# Altium footprint library sunrise_alarm.PcbLib: 1 footprints
Each footprint in its own frame and in the unit in brackets; x right, y up, seen from the top. Pads: shape width x height; smd on the part's side, far side on the other; paste and mask are expansions set on the pad; w line width, h text height; cw(c..) or ccw(c..) is an arc to the next point about the centre after c.
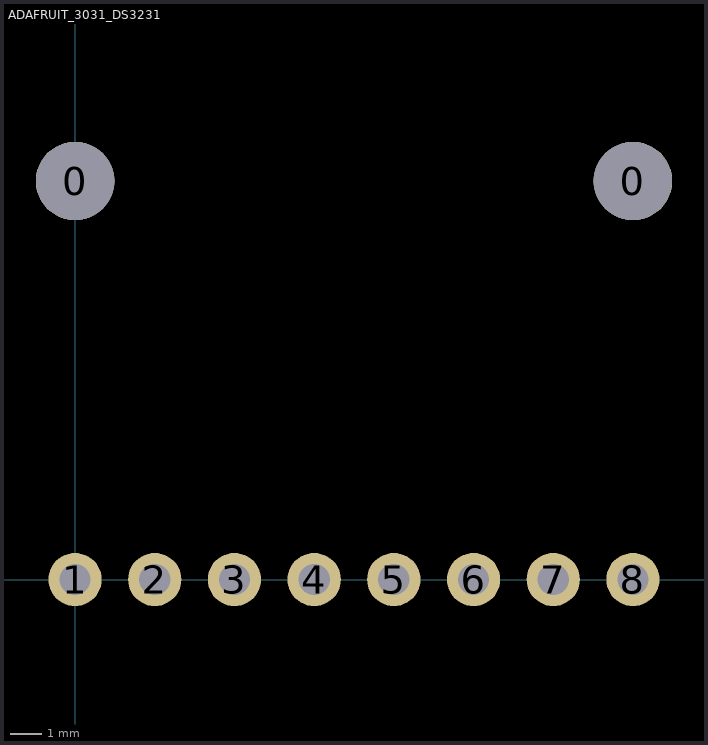
[diagram p0: the footprint, top view; thin cyan lines are the x and y axes]

## ADAFRUIT_3031_DS3231 [mm]
pads (10):
  round 2.5 hole 2.5 unplated: 0(0,12.7) 0(17.78,12.7)
  round 1.7 hole 1 square: 1(0,0)
  round 1.7 hole 1: 2(2.54,0) 3(5.08,0) 4(7.62,0) 5(10.16,0) 6(12.7,0) 7(15.24,0) 8(17.78,0)
3D body "3013 DS3231 RTC.step": height 12.72, standoff 5.3, extent -2.53,-2.5 20.33,15.28